# Altium footprint library PcbLib1.PcbLib: 332 footprints (part 18 of 22)
Each footprint in its own frame and in the unit in brackets; x right, y up, seen from the top. Pads: shape width x height; smd on the part's side, far side on the other; paste and mask are expansions set on the pad; w line width, h text height; cw(c..) or ccw(c..) is an arc to the next point about the centre after c.
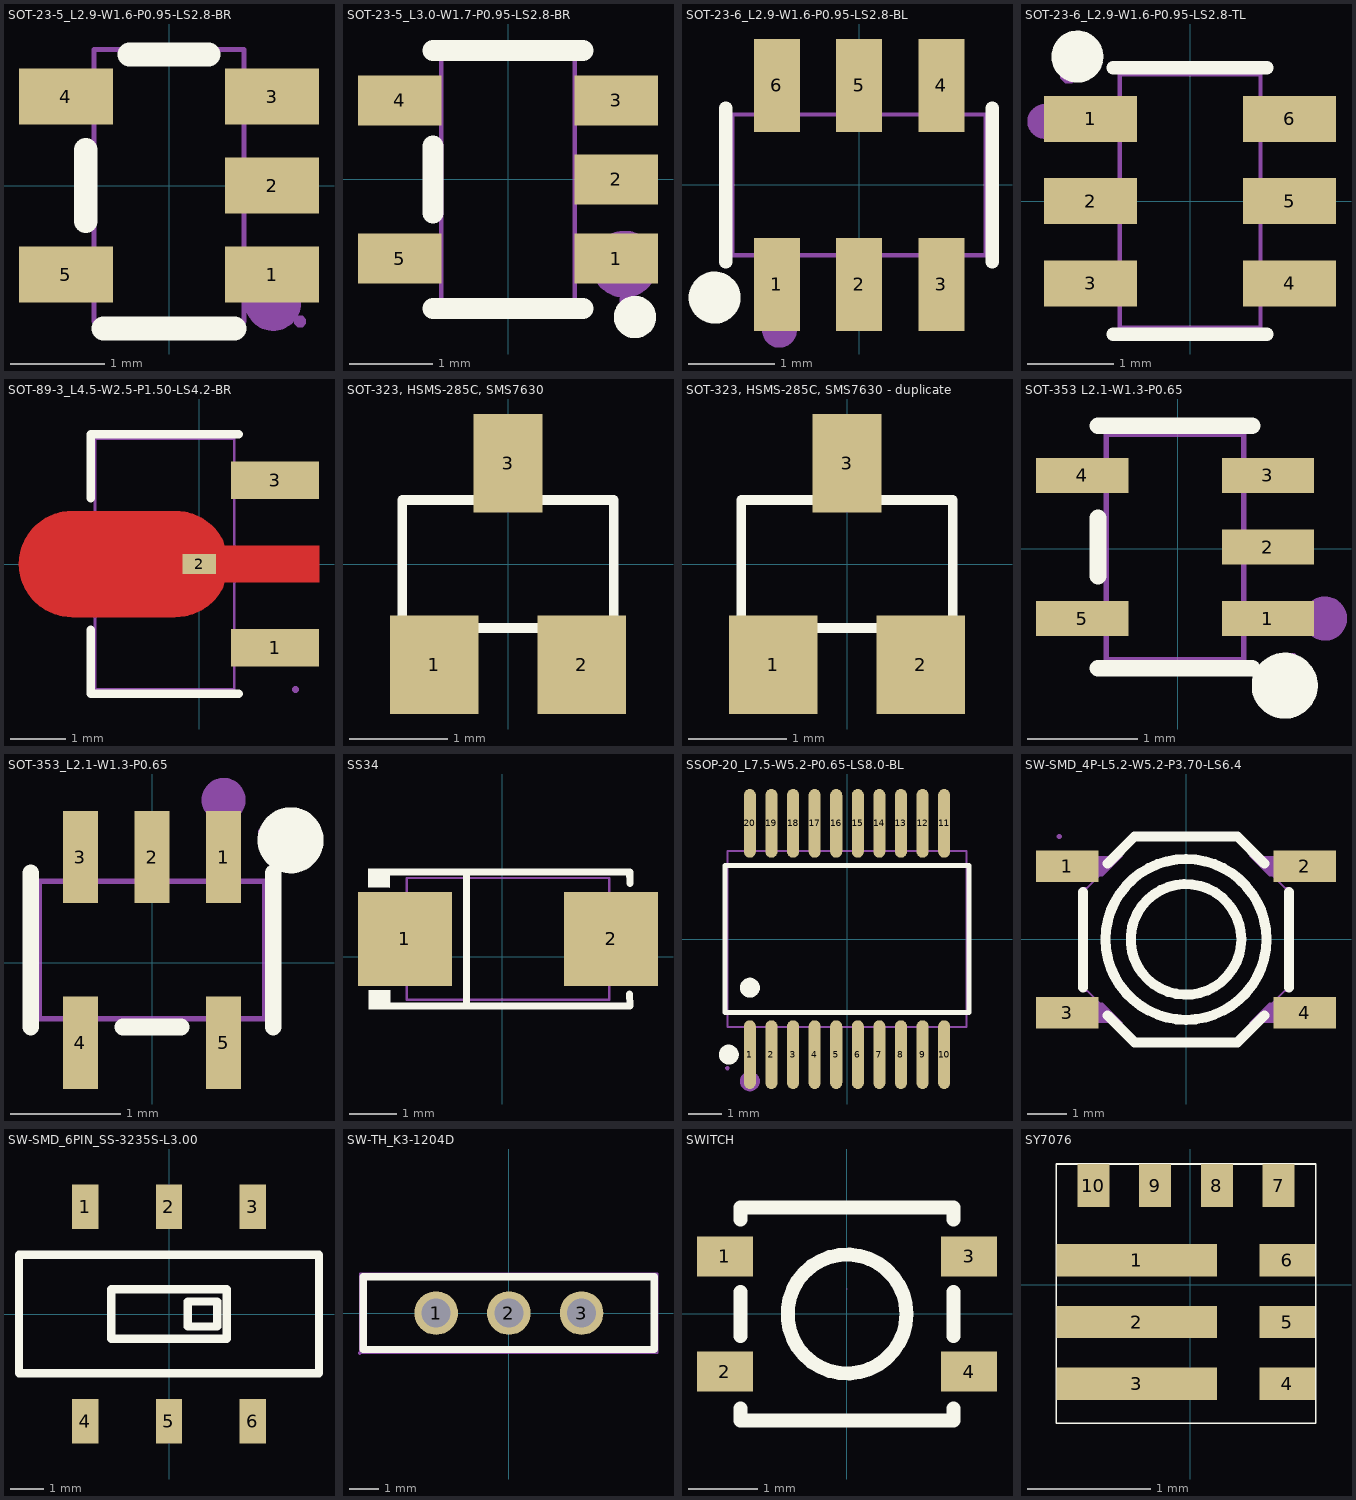
[diagram p17: the footprints below, top view; thin cyan lines are the x and y axes]

## SOT-23-5_L2.9-W1.6-P0.95-LS2.8-BR [mm]
pads (5):
  rect 1.001x0.599 smd mask+0.05: 1(1.1,-0.95) 2(1.1,0) 3(1.1,0.95) 4(-1.1,0.95) 5(-1.1,-0.95)
Top Overlay:
  lines w0.254: -0.889,-0.381 -0.889,0.381 ; -0.699,-1.524 0.699,-1.524 ; -0.422,1.397 0.422,1.397
Mechanical 6:
  circle w0.3: c1.11,-1.25 r0.15
Mechanical 15:
  region: 1.46,-1.45 1.46,-1.425 1.425,-1.389 1.374,-1.389 1.339,-1.425 1.339,-1.45 1.339,-1.476 1.374,-1.511 1.425,-1.511 1.46,-1.476 1.46,-1.45
  region: -0.95,-1.151 -1.4,-1.151 -1.4,-0.749 -0.95,-0.749
  region: -0.79,-1.151 -0.96,-1.151 -0.96,-0.749 -0.79,-0.749
  region: -0.95,0.749 -1.4,0.749 -1.4,1.151 -0.95,1.151
  region: -0.79,0.749 -0.96,0.749 -0.96,1.151 -0.79,1.151
  region: 1.4,-1.151 0.95,-1.151 0.95,-0.749 1.4,-0.749
  region: 0.96,-1.151 0.79,-1.151 0.79,-0.749 0.96,-0.749
  region: 1.4,0.749 0.95,0.749 0.95,1.151 1.4,1.151
  region: 0.96,0.749 0.79,0.749 0.79,1.151 0.96,1.151
  region: 1.4,-0.201 0.95,-0.201 0.95,0.201 1.4,0.201
  region: 0.96,-0.201 0.79,-0.201 0.79,0.201 0.96,0.201
  lines w0.051: -0.8,-1.45 0.8,-1.45 0.8,1.45 -0.8,1.45 -0.8,-1.45

## SOT-23-5_L3.0-W1.7-P0.95-LS2.8-BR [mm] "可用SGM2036"
pads (5):
  rect 1x0.6 smd mask+0.051: 1(1.3,-0.95) 2(1.3,0) 3(1.3,0.95) 4(-1.3,0.95) 5(-1.3,-0.95)
Top Overlay:
  circle w0.254: c1.524,-1.651 r0.127
  lines w0.254: -0.9,-1.55 0.9,-1.55 ; -0.9,-0.4 -0.9,0.4 ; -0.9,1.55 0.9,1.55
Mechanical 6:
  circle w0.4: c1.397,-1.016 r0.2
Mechanical 15:
  region: -1.4,-1.15 -1.4,-0.75 -0.95,-0.75 -0.95,-1.15
  region: -0.96,-1.15 -0.96,-0.75 -0.79,-0.75 -0.79,-1.15
  region: -1.4,0.75 -1.4,1.15 -0.95,1.15 -0.95,0.75
  region: -0.96,0.75 -0.96,1.15 -0.79,1.15 -0.79,0.75
  region: 0.95,0.75 0.95,1.15 1.4,1.15 1.4,0.75
  region: 0.79,0.75 0.79,1.15 0.96,1.15 0.96,0.75
  region: 0.95,-0.2 0.95,0.2 1.4,0.2 1.4,-0.2
  region: 0.79,-0.2 0.79,0.2 0.96,0.2 0.96,-0.2
  region: 0.95,-1.15 0.95,-0.75 1.4,-0.75 1.4,-1.15
  region: 0.79,-1.15 0.79,-0.75 0.96,-0.75 0.96,-1.15
  region: 1.46,-1.45 1.46,-1.425 1.425,-1.39 1.375,-1.39 1.34,-1.425 1.34,-1.45 1.34,-1.475 1.375,-1.51 1.425,-1.51 1.46,-1.475 1.46,-1.45
  lines w0.051: -0.8,-1.45 -0.8,1.45 0.8,1.45 0.8,-1.45 -0.8,-1.45

## SOT-23-6_L2.9-W1.6-P0.95-LS2.8-BL [mm]
pads (6):
  rect 0.532x1.072 smd paste+0 mask+0.051: 1(-0.95,-1.149) 2(0,-1.149) 3(0.95,-1.149) 4(0.95,1.149) 5(0,1.149) 6(-0.95,1.149)
Top Overlay:
  circle w0.3: c-1.668,-1.301 r0.15
  lines w0.152: -1.539,-0.889 -1.539,0.889 ; 1.539,-0.889 1.539,0.889
Mechanical 6:
  circle w0.2: c-0.92,-1.68 r0.1
Mechanical 15:
  region: -1.403,-1.4 -1.403,-1.375 -1.438,-1.34 -1.488,-1.34 -1.523,-1.375 -1.523,-1.4 -1.523,-1.425 -1.488,-1.46 -1.438,-1.46 -1.403,-1.425 -1.403,-1.4
  region: -1.165,-0.925 -0.735,-0.925 -0.735,-1.4 -1.165,-1.4
  region: -1.165,-0.803 -0.735,-0.803 -0.735,-0.935 -1.165,-0.935
  region: -0.215,-0.925 0.215,-0.925 0.215,-1.4 -0.215,-1.4
  region: -0.215,-0.803 0.215,-0.803 0.215,-0.935 -0.215,-0.935
  region: 0.735,-0.925 1.165,-0.925 1.165,-1.4 0.735,-1.4
  region: 0.735,-0.803 1.165,-0.803 1.165,-0.935 0.735,-0.935
  region: 0.735,0.925 1.165,0.925 1.165,1.4 0.735,1.4
  region: 0.735,0.935 1.165,0.935 1.165,0.803 0.735,0.803
  region: -0.215,0.925 0.215,0.925 0.215,1.4 -0.215,1.4
  region: -0.215,0.935 0.215,0.935 0.215,0.803 -0.215,0.803
  region: -1.165,0.925 -0.735,0.925 -0.735,1.4 -1.165,1.4
  region: -1.165,0.935 -0.735,0.935 -0.735,0.803 -1.165,0.803
  lines w0.051: -1.463,-0.813 1.463,-0.813 1.463,0.813 -1.463,0.813 -1.463,-0.813

## SOT-23-6_L2.9-W1.6-P0.95-LS2.8-TL [mm]
pads (6):
  rect 1.072x0.532 smd paste+0 mask+0.051: 1(-1.149,0.95) 2(-1.149,0) 3(-1.149,-0.95) 4(1.149,-0.95) 5(1.149,0) 6(1.149,0.95)
Top Overlay:
  circle w0.3: c-1.301,1.668 r0.15
  lines w0.152: -0.889,-1.539 0.889,-1.539 ; -0.889,1.539 0.889,1.539
Mechanical 6:
  circle w0.2: c-1.68,0.92 r0.1
Mechanical 15:
  region: -0.925,1.165 -0.925,0.735 -1.4,0.735 -1.4,1.165
  region: -0.803,1.165 -0.803,0.735 -0.935,0.735 -0.935,1.165
  region: -0.925,0.215 -0.925,-0.215 -1.4,-0.215 -1.4,0.215
  region: -0.803,0.215 -0.803,-0.215 -0.935,-0.215 -0.935,0.215
  region: -0.925,-0.735 -0.925,-1.165 -1.4,-1.165 -1.4,-0.735
  region: -0.803,-0.735 -0.803,-1.165 -0.935,-1.165 -0.935,-0.735
  region: 0.925,-0.735 0.925,-1.165 1.4,-1.165 1.4,-0.735
  region: 0.935,-0.735 0.935,-1.165 0.803,-1.165 0.803,-0.735
  region: 0.925,0.215 0.925,-0.215 1.4,-0.215 1.4,0.215
  region: 0.935,0.215 0.935,-0.215 0.803,-0.215 0.803,0.215
  region: 0.925,1.165 0.925,0.735 1.4,0.735 1.4,1.165
  region: 0.935,1.165 0.935,0.735 0.803,0.735 0.803,1.165
  region: -1.3,1.463 -1.3,1.504 -1.359,1.563 -1.441,1.563 -1.5,1.504 -1.5,1.463 -1.5,1.422 -1.441,1.363 -1.359,1.363 -1.3,1.422 -1.3,1.463
  lines w0.051: -0.813,-1.463 -0.813,1.463 0.813,1.463 0.813,-1.463 -0.813,-1.463

## SOT-89-3_L4.5-W2.5-P1.50-LS4.2-BR [mm]
pads (3):
  rect 1.575x0.672 smd paste+0 mask+0.051: 1(1.356,-1.5) 3(1.356,1.5)
  rect 0.6x0.35 smd mask+0.051: 2(0,0)
Top Layer:
  region: -2.283,0.95 -0.429,0.95 -0.384,0.949 -0.34,0.946 -0.296,0.94 -0.252,0.933 -0.208,0.924 -0.165,0.912 -0.123,0.899 -0.081,0.884 -0.04,0.866 0,0.847 0.04,0.826 0.078,0.803 0.115,0.779 0.151,0.752 0.185,0.724 0.219,0.695 0.251,0.664 0.281,0.631 0.31,0.597 0.337,0.562 0.362,0.525 0.386,0.488 0.408,0.449 0.428,0.409 0.447,0.33 2.144,0.33 2.144,-0.33 0.447,-0.33 0.428,-0.409 0.408,-0.449 0.386,-0.488 0.362,-0.526 0.337,-0.562 0.31,-0.597 0.281,-0.631 0.251,-0.664 0.219,-0.695 0.185,-0.725 0.151,-0.753 0.115,-0.779 0.078,-0.804 0.04,-0.827 0,-0.848 -0.04,-0.867 -0.081,-0.884 -0.123,-0.899 -0.165,-0.913 -0.208,-0.924 -0.252,-0.934 -0.296,-0.941 -0.34,-0.946 -0.384,-0.949 -0.429,-0.95 -2.283,-0.95 -2.328,-0.949 -2.372,-0.946 -2.416,-0.941 -2.46,-0.934 -2.504,-0.924 -2.547,-0.913 -2.589,-0.899 -2.631,-0.884 -2.672,-0.867 -2.713,-0.848 -2.752,-0.827 -2.79,-0.804 -2.827,-0.779 -2.863,-0.753 -2.898,-0.725 -2.931,-0.695 -2.963,-0.664 -2.993,-0.631 -3.022,-0.597 -3.049,-0.562 -3.075,-0.526 -3.098,-0.488 -3.12,-0.449 -3.141,-0.409 -3.159,-0.369 -3.175,-0.327 -3.189,-0.285 -3.202,-0.242 -3.212,-0.199 -3.22,-0.155 -3.227,-0.111 -3.231,-0.067 -3.233,-0.022 -3.233,0.022 -3.231,0.067 -3.227,0.111 -3.22,0.155 -3.212,0.199 -3.202,0.242 -3.189,0.285 -3.175,0.327 -3.159,0.369 -3.141,0.409 -3.12,0.449 -3.098,0.488 -3.075,0.525 -3.049,0.562 -3.022,0.597 -2.993,0.631 -2.963,0.664 -2.931,0.695 -2.898,0.724 -2.863,0.752 -2.827,0.779 -2.79,0.803 -2.752,0.826 -2.713,0.847 -2.672,0.866 -2.631,0.884 -2.589,0.899 -2.547,0.912 -2.504,0.924 -2.46,0.933 -2.416,0.94 -2.372,0.946 -2.328,0.949
Top Overlay:
  lines w0.152: -1.95,-1.177 -1.95,-2.326 0.702,-2.326 ; -1.95,1.177 -1.95,2.326 0.702,2.326
Mechanical 6:
  circle w0.3: c1.715,-1.5 r0.15
Mechanical 15:
  region: 0.624,1.75 1.724,1.75 1.724,1.25 0.624,1.25
  region: 0.624,-1.25 1.724,-1.25 1.724,-1.75 0.624,-1.75
  region: 0.439,-0.26 1.724,-0.26 1.724,0.26 0.439,0.26 -0.136,0.863 -2,0.863 -2.471,0.288 -2.471,-0.287 -2,-0.862 -0.136,-0.862
  region: 1.784,-2.25 1.784,-2.225 1.749,-2.19 1.699,-2.19 1.664,-2.225 1.664,-2.25 1.664,-2.275 1.699,-2.31 1.749,-2.31 1.784,-2.275 1.784,-2.25
  lines w0.051: -1.874,-2.25 0.626,-2.25 0.626,2.25 -1.874,2.25 -1.874,-2.25

## SOT-323, HSMS-285C, SMS7630 [mm] "SOT-323/SC-70; 3 Leads; HSMS-285C"
height 1
pads (3):
  rect 0.9x1 smd: 1(-0.75,-1.025) 2(0.75,-1.025)
  rect 0.7x1 smd: 3(0,1.025)
Top Overlay:
  lines w0.1: -1.075,-0.65 -1.075,0.65 1.075,0.65 1.075,-0.65 -1.075,-0.65

## SOT-323, HSMS-285C, SMS7630 - duplicate [mm] "SOT-323/SC-70; 3 Leads; HSMS-285C"
height 1
pads (3):
  rect 0.9x1 smd: 1(-0.75,-1.025) 2(0.75,-1.025)
  rect 0.7x1 smd: 3(0,1.025)
Top Overlay:
  lines w0.1: -1.075,-0.65 -1.075,0.65 1.075,0.65 1.075,-0.65 -1.075,-0.65

## SOT-353 L2.1-W1.3-P0.65 [mm]
pads (5):
  rect 0.839x0.315 smd: 1(0.82,-0.635) 2(0.82,0.015) 3(0.82,0.665) 4(-0.869,0.665) 5(-0.869,-0.635)
Top Overlay:
  circle w0.3: c0.972,-1.245 r0.15
  lines w0.152: -0.726,-1.086 0.677,-1.086 ; -0.726,-0.249 -0.726,0.279 ; -0.726,1.116 0.677,1.116
Mechanical 6:
  circle w0.2: c1.338,-0.635 r0.1
Mechanical 15:
  region: 1.098,-1.01 1.098,-0.985 1.063,-0.95 1.013,-0.95 0.978,-0.985 0.978,-1.01 0.978,-1.035 1.013,-1.07 1.063,-1.07 1.098,-1.035 1.098,-1.01
  region: 0.703,-0.748 0.703,-0.522 1.038,-0.522 1.038,-0.748
  region: 0.59,-0.748 0.59,-0.522 0.713,-0.522 0.713,-0.748
  region: 0.703,-0.098 0.703,0.127 1.038,0.127 1.038,-0.098
  region: 0.59,-0.098 0.59,0.127 0.713,0.127 0.713,-0.098
  region: 0.703,0.552 0.703,0.778 1.038,0.778 1.038,0.552
  region: 0.59,0.552 0.59,0.778 0.713,0.778 0.713,0.552
  region: -0.752,0.552 -0.752,0.778 -1.087,0.778 -1.087,0.552
  region: -0.762,0.552 -0.762,0.778 -0.64,0.778 -0.64,0.552
  region: -0.752,-0.748 -0.752,-0.522 -1.087,-0.522 -1.087,-0.748
  region: -0.762,-0.748 -0.762,-0.522 -0.64,-0.522 -0.64,-0.748
  lines w0.051: -0.65,-1.01 -0.65,1.04 0.6,1.04 0.6,-1.01 -0.65,-1.01

## SOT-353_L2.1-W1.3-P0.65 [mm]
pads (5):
  rect 0.315x0.839 smd: 1(0.65,0.961) 2(0,0.961) 3(-0.65,0.961) 4(-0.65,-0.727) 5(0.65,-0.727)
Top Overlay:
  circle w0.3: c1.26,1.114 r0.15
  lines w0.152: -1.101,-0.584 -1.101,0.818 ; -0.264,-0.584 0.264,-0.584 ; 1.101,-0.584 1.101,0.818
Mechanical 6:
  circle w0.2: c0.65,1.479 r0.1
Mechanical 15:
  region: 0.763,-0.62 0.537,-0.62 0.537,-0.498 0.763,-0.498
  region: 0.763,-0.611 0.537,-0.611 0.537,-0.946 0.763,-0.946
  region: -0.537,-0.62 -0.763,-0.62 -0.763,-0.498 -0.537,-0.498
  region: -0.537,-0.611 -0.763,-0.611 -0.763,-0.946 -0.537,-0.946
  region: -0.537,0.732 -0.763,0.732 -0.763,0.854 -0.537,0.854
  region: -0.537,0.844 -0.763,0.844 -0.763,1.179 -0.537,1.179
  region: 0.112,0.732 -0.113,0.732 -0.112,0.854 0.112,0.854
  region: 0.112,0.844 -0.112,0.844 -0.113,1.179 0.112,1.179
  region: 0.763,0.732 0.537,0.732 0.537,0.854 0.763,0.854
  region: 0.763,0.844 0.537,0.844 0.537,1.179 0.763,1.179
  region: 1.025,1.239 1,1.239 0.965,1.204 0.965,1.155 1,1.12 1.025,1.12 1.05,1.12 1.085,1.155 1.085,1.204 1.05,1.239 1.025,1.239
  lines w0.051: -1.025,-0.508 -1.025,0.742 1.025,0.742 1.025,-0.508 -1.025,-0.508

## SS34 [mm]
pads (2):
  rect 2x2 smd: 1(-2.073,0.381) 2(2.327,0.381)
Top Overlay:
  region: -2.385,-0.715 -2.386,-1.122 -2.846,-1.117 -2.842,-0.715
  region: -2.393,1.883 -2.394,1.477 -2.854,1.481 -2.85,1.883
  lines w0.152: -2.469,-1.045 2.723,-1.045 ; -2.469,1.807 2.723,1.807 2.73,1.568 ; -0.757,-1.045 -0.757,1.807 ; 2.72,-0.795 2.727,-1.034
Mechanical 2:
  region: 2.141,-0.294 2.141,1.056 1.938,1.056 1.938,-0.294
  region: 2.417,0.291 2.417,0.493 1.607,0.493 1.607,0.291
  region: -2.19,0.28 -2.19,0.482 -1.38,0.482 -1.38,0.28
Mechanical 6:
  lines w0.051: -2.033,-0.919 2.287,-0.919 2.287,1.681 -2.033,1.681 -2.033,-0.919
Mechanical 8:
  region: -2.418,-0.919 -2.418,-0.944 -2.453,-0.979 -2.503,-0.979 -2.538,-0.944 -2.538,-0.919 -2.538,-0.894 -2.503,-0.859 -2.453,-0.859 -2.418,-0.894 -2.418,-0.919
Mechanical 9:
  region: -1.353,1.106 -1.353,-0.344 -2.478,-0.344 -2.478,1.106
  region: 2.732,1.106 2.732,-0.344 1.607,-0.344 1.607,1.106

## SSOP-20_L7.5-W5.2-P0.65-LS8.0-BL [mm]
pads (20):
  oval 0.364x2.069 smd paste+0 mask+0.051: 1(-2.925,-3.482) 2(-2.275,-3.482) 3(-1.625,-3.482) 4(-0.975,-3.482) 5(-0.325,-3.482) 6(0.325,-3.482) 7(0.975,-3.482) 8(1.625,-3.482) 9(2.275,-3.482) 10(2.925,-3.482) 11(2.925,3.482) 12(2.275,3.482) 13(1.625,3.482) 14(0.975,3.482) 15(0.325,3.482) 16(-0.325,3.482) 17(-0.975,3.482) 18(-1.625,3.482) 19(-2.275,3.482) 20(-2.925,3.482)
Top Overlay:
  circle w0.3: c-3.559,-3.482 r0.15
  circle w0.3: c-2.925,-1.467 r0.15
  lines w0.152: -3.676,-2.219 3.676,-2.219 3.676,2.219 -3.676,2.219 -3.676,-2.219
Mechanical 6:
  circle w0.3: c-2.925,-4.285 r0.15
Mechanical 15:
  drawing of 45 lines, arcs and shapes, not listed

## SW-SMD_4P-L5.2-W5.2-P3.70-LS6.4 [mm]
pads (4):
  rect 1.58x0.8 smd paste+0 mask+0.051: 1(-3,1.85) 2(3,1.85) 3(-3,-1.85) 4(3,-1.85)
Top Overlay:
  circle w0.254: c0,0 r1.397
  circle w0.254: c0,0 r2.032
  lines w0.254: -2.6,-1.219 -2.6,1.2 ; -1.98,-1.92 -1.3,-2.6 1.3,-2.6 1.98,-1.92 ; -1.98,1.92 -1.3,2.6 1.3,2.6 1.98,1.92 ; 2.6,-1.219 2.6,1.2
Mechanical 15:
  region: -2.71,1.6 -2.71,2.1 -1.6,2.1 -2.1,1.6
  region: 2.71,2.1 2.71,1.6 2.1,1.6 1.6,2.1
  region: 2.71,-1.6 2.71,-2.1 1.6,-2.1 2.1,-1.6
  region: -3.2,1.6 -3.2,2.1 -2.7,2.1 -2.7,1.6
  region: 2.7,1.6 2.7,2.1 3.2,2.1 3.2,1.6
  region: -3.2,-2.1 -3.2,-1.6 -2.7,-1.6 -2.7,-2.1
  region: -2.71,-2.1 -2.71,-1.6 -2.1,-1.6 -1.6,-2.1
  region: 2.7,-2.1 2.7,-1.6 3.2,-1.6 3.2,-2.1
  region: -3.14,2.6 -3.14,2.625 -3.175,2.66 -3.225,2.66 -3.26,2.625 -3.26,2.6 -3.26,2.575 -3.225,2.54 -3.175,2.54 -3.14,2.575 -3.14,2.6
  lines w0.051: -2.6,-1.3 -2.6,1.3 -2.5,1.3 -1.3,2.5 -1.3,2.6 1.3,2.6 1.3,2.5 2.5,1.3 2.6,1.3 2.6,-1.3 2.5,-1.3 1.3,-2.5 1.3,-2.6 -1.3,-2.6 -1.3,-2.5 -2.5,-1.3 -2.6,-1.3

## SW-SMD_6PIN_SS-3235S-L3.00 [mm]
pads (6):
  rect 0.8x1.35 smd: 1(-2.54,3.25) 2(0,3.25) 3(2.54,3.25) 4(-2.54,-3.25) 5(0,-3.25) 6(2.54,-3.25)
Top Overlay:
  lines w0.254: -4.55,-1.8 4.55,-1.8 4.55,1.8 -4.55,1.8 -4.55,-1.8 ; -1.75,-0.75 1.75,-0.75 1.75,0.75 -1.75,0.75 -1.75,-0.75 ; 0.572,-0.381 1.46,-0.381 1.46,0.381 0.572,0.381 0.572,-0.381

## SW-TH_K3-1204D [mm]
pads (3):
  round 1.5 hole 1 paste-2539.97 mask+0.051: 1(-2.5,0) 2(0,0) 3(2.5,0)
Top Overlay:
  lines w0.254: -5,-1.25 -5,1.249 5,1.249 5,-1.25 -5,-1.25
Mechanical 15:
  region: -2.1,0 -2.1,0.08 -2.161,0.227 -2.273,0.339 -2.42,0.4 -2.58,0.4 -2.727,0.339 -2.839,0.227 -2.9,0.08 -2.9,0 -2.9,-0.08 -2.839,-0.227 -2.727,-0.339 -2.58,-0.4 -2.42,-0.4 -2.273,-0.339 -2.161,-0.227 -2.1,-0.08 -2.1,0
  region: 0.4,0 0.4,0.08 0.339,0.227 0.226,0.339 0.079,0.4 -0.08,0.4 -0.227,0.339 -0.339,0.227 -0.4,0.08 -0.4,0 -0.4,-0.08 -0.339,-0.227 -0.227,-0.339 -0.08,-0.4 0.079,-0.4 0.226,-0.339 0.339,-0.227 0.4,-0.08 0.4,0
  region: 2.9,0 2.9,0.08 2.839,0.227 2.727,0.339 2.58,0.4 2.42,0.4 2.273,0.339 2.161,0.227 2.1,0.08 2.1,0 2.1,-0.08 2.161,-0.227 2.273,-0.339 2.42,-0.4 2.58,-0.4 2.727,-0.339 2.839,-0.227 2.9,-0.08 2.9,0
  region: -5.067,-1.377 -5.067,-1.353 -5.102,-1.317 -5.152,-1.317 -5.187,-1.353 -5.187,-1.377 -5.187,-1.402 -5.152,-1.437 -5.102,-1.437 -5.067,-1.402 -5.067,-1.377
  lines w0.051: -5.127,-1.377 -5.127,1.376 5.127,1.376 5.127,-1.377 -5.127,-1.377

## SWITCH [mm]
pads (4):
  rect 0.8x0.575 smd: 1(-1.75,0.825) 2(-1.75,-0.825) 3(1.75,0.825) 4(1.75,-0.825)
Top Overlay:
  circle w0.2: c0,0 r0.852
  lines w0.2: -1.524,-1.356 -1.524,-1.524 1.524,-1.524 1.524,-1.356 ; -1.524,-0.319 -1.524,0.319 ; -1.524,1.356 -1.524,1.524 1.524,1.524 1.524,1.356 ; 1.524,-0.319 1.524,0.319
Mechanical 15:
  lines w0.003: 0,0.362 0,0.363

## SY7076 [mm]
pads (10):
  rect 1.3x0.26 smd: 1(-0.435,0.198) 2(-0.435,-0.302) 3(-0.435,-0.802)
  rect 0.45x0.26 smd: 4(0.785,-0.802) 5(0.785,-0.302) 6(0.785,0.198)
  rect 0.26x0.35 smd: 7(0.715,0.803) 8(0.215,0.803) 9(-0.285,0.803) 10(-0.785,0.803)
Top Overlay:
  lines w0.013: -1.085,-1.122 1.015,-1.122 1.015,0.978 -1.085,0.978 -1.085,-1.122